# Altium schematic symbol library ERA6AEB304V.SchLib: 1 symbol
Pins are listed as number, name and electrical type; pins without a type are passive.

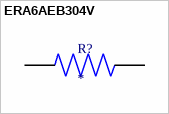
[diagram p0: symbol ERA6AEB304V]

## ERA6AEB304V
designator R?
RES SMD 300K OHM 0.1% 1/8W 0805; MP: ERA6AEB304V; Availability: Unavailable; Value: *; Price: None; Package: None; ComponentLink1Description: Digikey link; ComponentLink1URL: https://www.digikey.com/en/products/detail/panasonic-industry/ERA-6AEB304V/1465808
footprint RES_ERA6AEB304V
pins: 1, 2